# Altium integrated library TPS26600RHFT.IntLib: 1 symbol
Pins are listed as number, name and electrical type; pins without a type are passive.

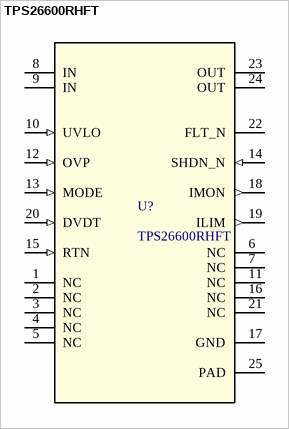
[diagram p0: symbol TPS26600RHFT]

## TPS26600RHFT
designator U?
4.2-V to 60-V, 150m&Omega;, 0.1-2.23A eFuse with integrated input reverse polarity protection 24-VQFN -40 to 125; Manufacturer_Name: Texas Instruments; TYPE: TYPE; RefDes: RefDes; Copyright: Copyright (C) 2026 Ultra Librarian. All rights reserved.; Manufacturer_Part_Number: TPS26600RHFT; Datasheet: https://www.ti.com/lit/gpn/tps2660
footprint RHF0024A
pins: 1 NC, 2 NC, 3 NC, 4 NC, 5 NC, 6 NC, 7 NC, 8 IN (power), 9 IN (power), 10 UVLO (in), 11 NC, 12 OVP (in), 13 MODE (in), 14 SHDN_N (in), 15 RTN (in), 16 NC, 17 GND (power), 18 IMON (out), 19 ILIM (out), 20 DVDT (in), 21 NC, 22 FLT_N (oc), 23 OUT (power), 24 OUT (power), 25 PAD (power)